# Altium footprint library basicfootprints.PcbLib: 522 footprints (part 23 of 33)
Each footprint in its own frame and in the unit in brackets; x right, y up, seen from the top. Pads: shape width x height; smd on the part's side, far side on the other; paste and mask are expansions set on the pad; w line width, h text height; cw(c..) or ccw(c..) is an arc to the next point about the centre after c.
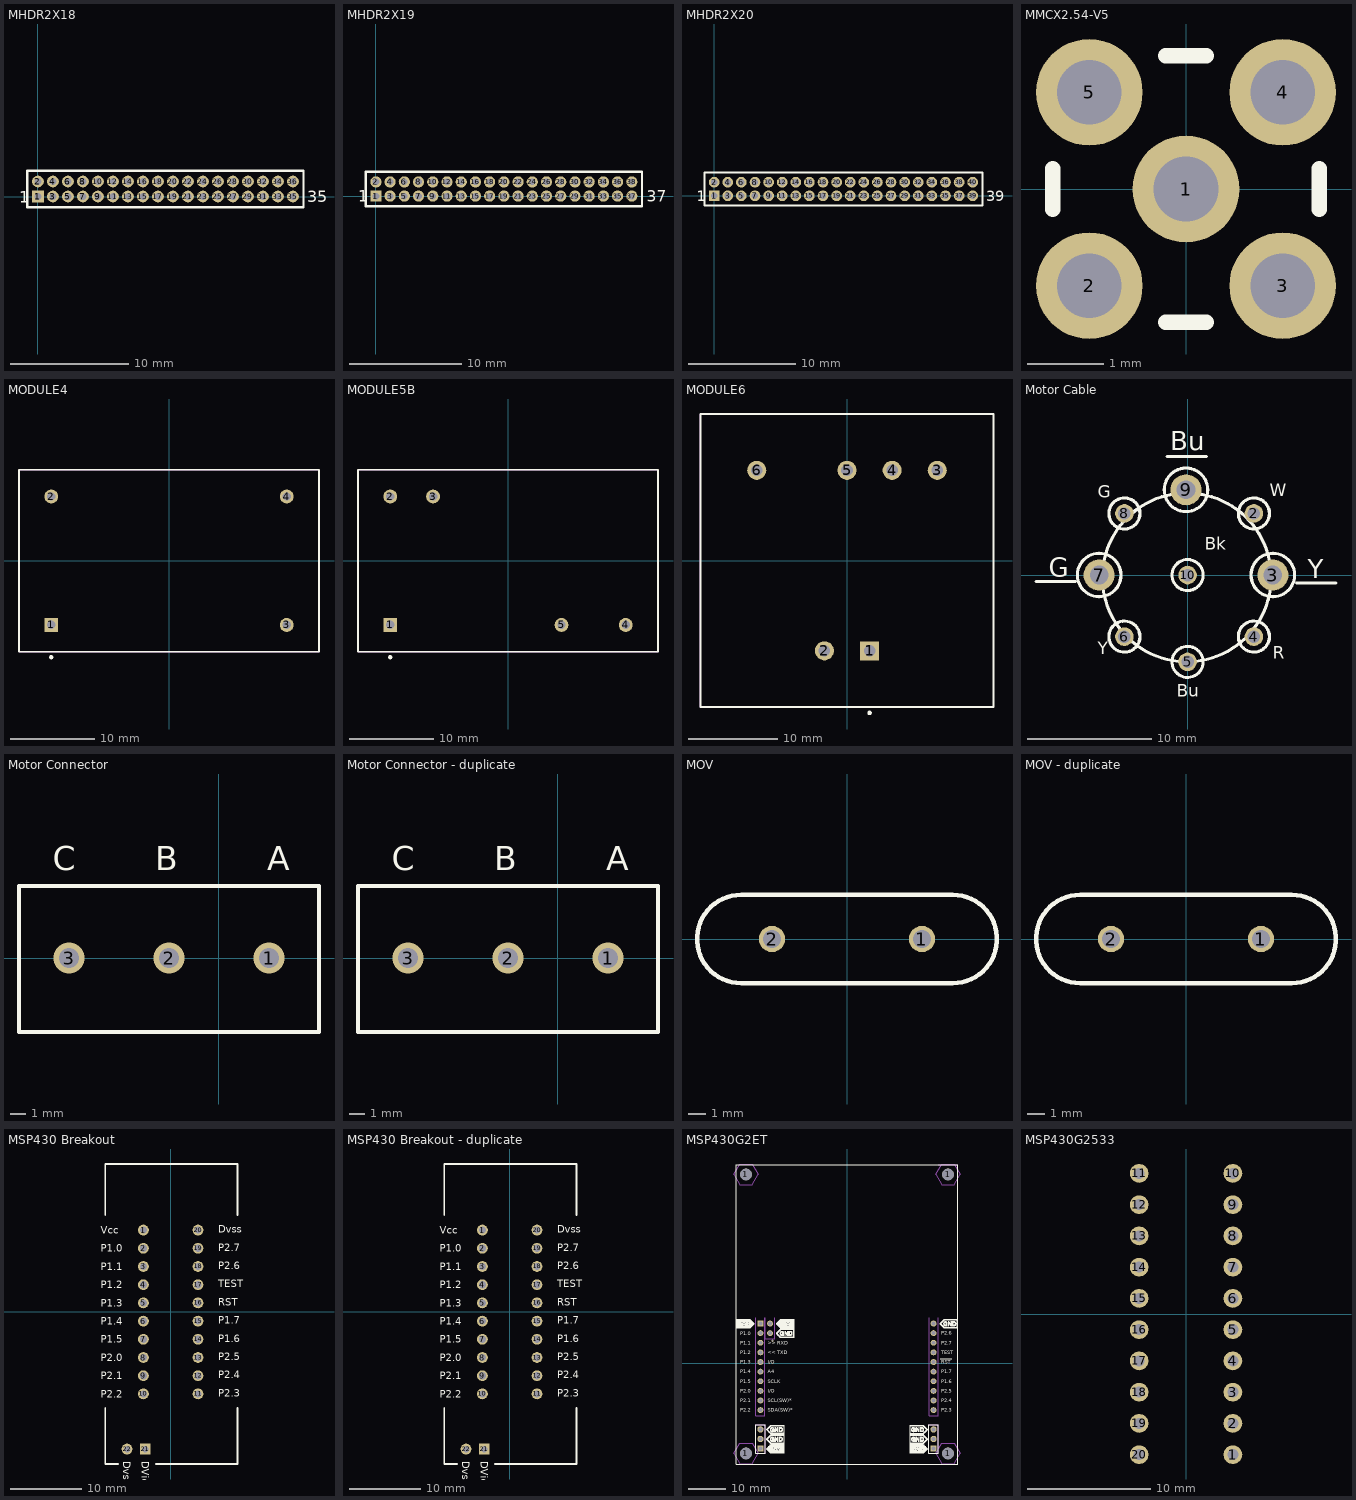
[diagram p22: the footprints below, top view; thin cyan lines are the x and y axes]

## MHDR2X18 [mm] "Connector; Header; 18x2 Position"
pads (36):
  rect 1x1 hole 0.6: 1(0,0)
  round 1 hole 0.6: 2(0,1.27) 3(1.27,0) 4(1.27,1.27) 5(2.54,0) 6(2.54,1.27) 7(3.81,0) 8(3.81,1.27) 9(5.08,0) 10(5.08,1.27) 11(6.35,0) 12(6.35,1.27) 13(7.62,0) 14(7.62,1.27) 15(8.89,0) 16(8.89,1.27) 17(10.16,0) 18(10.16,1.27) 19(11.43,0) 20(11.43,1.27) 21(12.7,0) 22(12.7,1.27) 23(13.97,0) 24(13.97,1.27) 25(15.24,0) 26(15.24,1.27) 27(16.51,0) 28(16.51,1.27) 29(17.78,0) 30(17.78,1.27) 31(19.05,0) 32(19.05,1.27) 33(20.32,0) 34(20.32,1.27) 35(21.59,0) 36(21.59,1.27)
Top Overlay:
  lines w0.2: -0.9,-0.9 22.49,-0.9 22.49,2.17 -0.9,2.17 -0.9,-0.9
  text "1" at -1.6,-0.508 h1
  text "35" at 22.8,-0.501 h1

## MHDR2X19 [mm] "Connector; Header; 19x2 Position"
pads (38):
  rect 1x1 hole 0.6: 1(0,0)
  round 1 hole 0.6: 2(0,1.27) 3(1.27,0) 4(1.27,1.27) 5(2.54,0) 6(2.54,1.27) 7(3.81,0) 8(3.81,1.27) 9(5.08,0) 10(5.08,1.27) 11(6.35,0) 12(6.35,1.27) 13(7.62,0) 14(7.62,1.27) 15(8.89,0) 16(8.89,1.27) 17(10.16,0) 18(10.16,1.27) 19(11.43,0) 20(11.43,1.27) 21(12.7,0) 22(12.7,1.27) 23(13.97,0) 24(13.97,1.27) 25(15.24,0) 26(15.24,1.27) 27(16.51,0) 28(16.51,1.27) 29(17.78,0) 30(17.78,1.27) 31(19.05,0) 32(19.05,1.27) 33(20.32,0) 34(20.32,1.27) 35(21.59,0) 36(21.59,1.27) 37(22.86,0) 38(22.86,1.27)
Top Overlay:
  lines w0.2: -0.9,-0.9 23.76,-0.9 23.76,2.17 -0.9,2.17 -0.9,-0.9
  text "1" at -1.6,-0.508 h1
  text "37" at 24.2,-0.508 h1

## MHDR2X20 [mm] "Connector; Header; 20x2 Position"
pads (40):
  rect 1x1 hole 0.6: 1(0,0)
  round 1 hole 0.6: 2(0,1.27) 3(1.27,0) 4(1.27,1.27) 5(2.54,0) 6(2.54,1.27) 7(3.81,0) 8(3.81,1.27) 9(5.08,0) 10(5.08,1.27) 11(6.35,0) 12(6.35,1.27) 13(7.62,0) 14(7.62,1.27) 15(8.89,0) 16(8.89,1.27) 17(10.16,0) 18(10.16,1.27) 19(11.43,0) 20(11.43,1.27) 21(12.7,0) 22(12.7,1.27) 23(13.97,0) 24(13.97,1.27) 25(15.24,0) 26(15.24,1.27) 27(16.51,0) 28(16.51,1.27) 29(17.78,0) 30(17.78,1.27) 31(19.05,0) 32(19.05,1.27) 33(20.32,0) 34(20.32,1.27) 35(21.59,0) 36(21.59,1.27) 37(22.86,0) 38(22.86,1.27) 39(24.13,0) 40(24.13,1.27)
Top Overlay:
  lines w0.2: -0.9,-0.9 25.03,-0.9 25.03,2.17 -0.9,2.17 -0.9,-0.9
  text "1" at -1.6,-0.508 h1
  text "39" at 25.4,-0.508 h1

## MMCX2.54-V5 [mm] "Connector; RF Coaxial, MMCX, Thru-Hole; 5 Position; Vertical"
height 4.45
pads (5):
  round 1.4 hole 0.85: 1(0,0) 2(-1.27,-1.27) 3(1.27,-1.27) 4(1.27,1.27) 5(-1.27,1.27)
Top Overlay:
  lines w0.2: -1.75,-0.27 -1.75,0.27 ; -0.27,-1.75 0.27,-1.75 ; -0.27,1.75 0.27,1.75 ; 1.75,-0.27 1.75,0.27

## MODULE4 [mm] "DIP; 4 Round Pins; Row Space 27.94 mm; Pitch 15.24 mm"
height 14
pads (4):
  rect 1.65x1.65 hole 1: 1(-13.97,-7.62)
  round 1.65 hole 1: 2(-13.97,7.62) 3(13.97,-7.62) 4(13.97,7.62)
Top Overlay:
  circle w0.25: c-13.97,-11.45 r0.125
  lines w0.2: -17.8,-10.8 17.8,-10.8 17.8,10.8 -17.8,10.8 -17.8,-10.8
Mechanical 13:
  lines w0.1: -17.8,-10.8 17.8,-10.8 17.8,10.8 -17.8,10.8 -17.8,-10.8
3D body: height 14, standoff 0, extent -17.8,-10.8 17.8,10.8

## MODULE5B [mm] "DIP; 5 Round Pins; Row Space 15.24 mm; Pitch 2.54 mm"
height 14
pads (5):
  rect 1.65x1.65 hole 1: 1(-13.97,-7.62)
  round 1.65 hole 1: 2(-13.97,7.62) 3(-8.89,7.62) 4(13.97,-7.62) 5(6.35,-7.62)
Top Overlay:
  circle w0.25: c-13.97,-11.45 r0.125
  lines w0.2: -17.8,-10.8 17.8,-10.8 17.8,10.8 -17.8,10.8 -17.8,-10.8
Mechanical 13:
  lines w0.1: -17.8,-10.8 -17.8,10.8 17.8,10.8 17.8,-10.8 -17.8,-10.8
3D body: height 14, standoff 0, extent -17.8,-10.8 17.8,10.8

## MODULE6 [mm] "DIP; 6 Round Pins; Row Space 20.32 mm; Pitch 2.54 mm"
height 16.5
pads (6):
  rect 2.15x2.15 hole 1.3: 1(2.54,-10.16)
  round 2.15 hole 1.3: 2(-2.54,-10.16) 3(10.16,10.16) 4(5.08,10.16) 5(0,10.16) 6(-10.16,10.16)
Top Overlay:
  circle w0.25: c2.54,-17.15 r0.125
  lines w0.2: -16.5,-16.5 -16.5,16.5 16.5,16.5 16.5,-16.5 -16.5,-16.5
Mechanical 13:
  lines w0.1: -16.5,-16.5 -16.5,16.5 16.5,16.5 16.5,-16.5 -16.5,-16.5
3D body: height 16.5, standoff 0, extent -16.5,-16.5 16.5,16.5

## Motor Cable [mm]
height 5.6
pads (9):
  round 1.5 hole 1: 2(5.334,4.953) 4(5.334,-4.953) 5(0,-6.985) 6(-5.08,-4.953) 8(-5.08,4.953) 10(0,0)
  round 2.5 hole 1.5: 3(6.858,0) 7(-7.112,0) 9(-0.127,6.858)
Top Overlay:
  circle w0.254: c5.334,4.953 r1.25
  circle w0.254: c-0.063,-0.19 r6.788
  circle w0.254: c-5.08,-4.953 r1.25
  circle w0.254: c0,-6.985 r1.25
  circle w0.254: c-5.08,4.953 r1.25
  circle w0.254: c0,0 r1.25
  circle w0.254: c5.334,-4.953 r1.25
  circle w0.254: c-7.112,0 r1.75
  circle w0.254: c6.858,0 r1.75
  circle w0.254: c-0.127,6.858 r1.75
  lines w0.254: -12.192,-0.508 -9.017,-0.508 ; -1.651,9.525 1.524,9.525 ; 8.763,-0.635 11.938,-0.635
  text "W" at 6.604,6.35 h1
  text "Bu" at -0.889,-9.779 h1
  text "Bu" at -1.397,10.033 h1.52
  text "Bk" at 1.397,2.032 h1
  text "R" at 6.858,-6.731 h1
  text "Y" at -7.239,-6.35 h1
  text "G" at -7.239,6.223 h1
  text "Y" at 9.652,-0.254 h1.52
  text "G" at -11.176,-0.127 h1.52

## Motor Connector [mm] "Phoenix 3-terminal Block Screw connector"
pads (3):
  round 2 hole 1.3: 1(3.175,0) 2(-3.175,0) 3(-9.525,0)
Top Overlay:
  lines w0.254: -12.7,-4.699 6.35,-4.699 6.35,4.572 -12.7,4.572 -12.7,-4.699
  text "A" at 3.048,5.588 h1.52
  text "B" at -4.064,5.588 h1.52
  text "C" at -10.541,5.588 h1.52
3D body "User Library-3 Way PCB Screw Terminal Block 5mm.step": height 15.2, standoff -3.5, extent -10.548,-4.555 4.452,4.445

## Motor Connector - duplicate [mm] "Phoenix 3-terminal Block Screw connector"
pads (3):
  round 2 hole 1.3: 1(3.175,0) 2(-3.175,0) 3(-9.525,0)
Top Overlay:
  lines w0.254: -12.7,-4.699 6.35,-4.699 6.35,4.572 -12.7,4.572 -12.7,-4.699
  text "A" at 3.048,5.588 h1.52
  text "B" at -4.064,5.588 h1.52
  text "C" at -10.541,5.588 h1.52
3D body "User Library-3 Way PCB Screw Terminal Block 5mm.step": height 15.2, standoff -3.5, extent -10.548,-4.555 4.452,4.445

## MOV [mm] "ZA Series MOXV"
pads (2):
  round 1.5 hole 1: 1(4.25,0) 2(-4.25,0)
Top Overlay:
  lines w0.254: -6,-2.5 cw(c-6,0) -6,2.5 6,2.5 cw(c6,0) 6,-2.5 -6,-2.5

## MOV - duplicate [mm] "ZA Series MOXV"
pads (2):
  round 1.5 hole 1: 1(4.25,0) 2(-4.25,0)
Top Overlay:
  lines w0.254: -6,-2.5 cw(c-6,0) -6,2.5 6,2.5 cw(c6,0) 6,-2.5 -6,-2.5

## MSP430 Breakout [mm] "MSP430F5172 Breakout Board for ECE 482"
pads (22):
  round 1.5 hole 1: 1(-3.81,11.43) 2(-3.81,8.89) 3(-3.81,6.35) 4(-3.81,3.81) 5(-3.81,1.27) 6(-3.81,-1.27) 7(-3.81,-3.81) 8(-3.81,-6.35) 9(-3.81,-8.89) 10(-3.81,-11.43) 11(3.81,-11.43) 12(3.81,-8.89) 13(3.81,-6.35) 14(3.81,-3.81) 15(3.81,-1.27) 16(3.81,1.27) 17(3.81,3.81) 18(3.81,6.35) 19(3.81,8.89) 20(3.81,11.43)
  rect 1.5x1.5 hole 0.9: 21(-3.556,-19.126)
  round 1.5 hole 0.9: 22(-6.096,-19.126)
Top Overlay:
  lines w0.254: -9.144,-13.386 -9.144,-21.209 -7.341,-21.209 ; -9.144,13.487 -9.144,20.65 9.296,20.65 9.296,13.487 ; -2.057,-21.209 9.296,-21.209 9.296,-13.386
  text "P2.2" at -9.779,-11.938 h1
  text "P2.1" at -9.779,-9.398 h1
  text "P2.0" at -9.779,-6.858 h1
  text "P1.5" at -9.779,-4.318 h1
  text "P1.4" at -9.779,-1.778 h1
  text "P1.3" at -9.779,0.762 h1
  text "P1.2" at -9.779,3.302 h1
  text "P1.1" at -9.779,5.842 h1
  text "P1.0" at -9.779,8.382 h1
  text "Vcc" at -9.779,10.922 h1
  text "Dvss" at 6.604,11.049 h1
  text "P2.7" at 6.604,8.509 h1
  text "P2.6" at 6.604,5.969 h1
  text "TEST" at 6.604,3.429 h1
  text "RST" at 6.604,0.889 h1
  text "P1.7" at 6.604,-1.651 h1
  text "P1.6" at 6.604,-4.191 h1
  text "P2.5" at 6.604,-6.731 h1
  text "P2.4" at 6.604,-9.271 h1
  text "P2.3" at 6.604,-11.811 h1
  text "Dvss" at -6.604,-20.853 h1
  text "DVio" at -4.064,-20.853 h1
3D body "LaunchPad-Adapter-PCB-v2.step": height 6.3, standoff -5.1, extent -8.611,-20.879 8.915,20.269

## MSP430 Breakout - duplicate [mm] "MSP430F5172 Breakout Board for ECE 482"
pads (22):
  round 1.5 hole 1: 1(-3.81,11.43) 2(-3.81,8.89) 3(-3.81,6.35) 4(-3.81,3.81) 5(-3.81,1.27) 6(-3.81,-1.27) 7(-3.81,-3.81) 8(-3.81,-6.35) 9(-3.81,-8.89) 10(-3.81,-11.43) 11(3.81,-11.43) 12(3.81,-8.89) 13(3.81,-6.35) 14(3.81,-3.81) 15(3.81,-1.27) 16(3.81,1.27) 17(3.81,3.81) 18(3.81,6.35) 19(3.81,8.89) 20(3.81,11.43)
  rect 1.5x1.5 hole 0.9: 21(-3.556,-19.126)
  round 1.5 hole 0.9: 22(-6.096,-19.126)
Top Overlay:
  lines w0.254: -9.144,-13.386 -9.144,-21.209 -7.341,-21.209 ; -9.144,13.487 -9.144,20.65 9.296,20.65 9.296,13.487 ; -2.057,-21.209 9.296,-21.209 9.296,-13.386
  text "P2.2" at -9.779,-11.938 h1
  text "P2.1" at -9.779,-9.398 h1
  text "P2.0" at -9.779,-6.858 h1
  text "P1.5" at -9.779,-4.318 h1
  text "P1.4" at -9.779,-1.778 h1
  text "P1.3" at -9.779,0.762 h1
  text "P1.2" at -9.779,3.302 h1
  text "P1.1" at -9.779,5.842 h1
  text "P1.0" at -9.779,8.382 h1
  text "Vcc" at -9.779,10.922 h1
  text "Dvss" at 6.604,11.049 h1
  text "P2.7" at 6.604,8.509 h1
  text "P2.6" at 6.604,5.969 h1
  text "TEST" at 6.604,3.429 h1
  text "RST" at 6.604,0.889 h1
  text "P1.7" at 6.604,-1.651 h1
  text "P1.6" at 6.604,-4.191 h1
  text "P2.5" at 6.604,-6.731 h1
  text "P2.4" at 6.604,-9.271 h1
  text "P2.3" at 6.604,-11.811 h1
  text "Dvss" at -6.604,-20.853 h1
  text "DVio" at -4.064,-20.853 h1
3D body "LaunchPad-Adapter-PCB-v2.step": height 6.3, standoff -5.1, extent -8.611,-20.879 8.915,20.269

## MSP430G2ET [mm] "MSP430 Launchapad connector"
pads (34):
  round 3.048 hole 3.175 unplated mask+0.381: 1(-26.67,-23.825) 1(-26.67,49.835) 1(26.67,-23.825) 1(26.67,49.835)
  rrect6% 1.55x1.55 hole 1.02: 1(-22.86,10.465)
  rect 1.65x1.65 hole 1.016: 1(22.86,-22.555) 21(-22.86,-22.555)
  round 1.55 hole 1.02: 2(-22.86,7.925) 3(-22.86,5.385) 4(-22.86,2.845) 5(-22.86,0.305) 6(-22.86,-2.235) 7(-22.86,-4.775) 8(-22.86,-7.315) 9(-22.86,-9.855) 10(-22.86,-12.395) 11(22.86,-12.395) 12(22.86,-9.855) 13(22.86,-7.315) 14(22.86,-4.775) 15(22.86,-2.235) 16(22.86,0.305) 17(22.86,2.845) 18(22.86,5.385) 19(22.86,7.925) 20(-20.32,7.925) 20(22.86,10.465) 21(-20.32,10.465)
  round 1.65 hole 1.016: 20(-22.86,-20.015) 20(-22.86,-17.475) 20(22.86,-20.015) 20(22.86,-17.475)
  round 2.8 hole 3 unplated mask+0.102: ""(-26.67,49.835) ""(26.67,49.835)
via -19.68,5.935 diameter 0.6 hole 0.3
Mid-Layer 2:
  region: 23.072,-16.684 23.27,-16.766 23.44,-16.896 23.57,-17.066 23.652,-17.263 23.68,-17.475 23.652,-17.688 23.57,-17.885 23.44,-18.055 23.27,-18.185 23.072,-18.267 22.86,-18.295 22.648,-18.267 22.45,-18.185 22.28,-18.055 22.15,-17.885 22.068,-17.688 22.04,-17.475 22.068,-17.263 22.15,-17.066 22.28,-16.896 22.45,-16.766 22.648,-16.684 22.86,-16.656
  region: -22.648,-16.684 -22.45,-16.766 -22.28,-16.896 -22.15,-17.066 -22.068,-17.263 -22.04,-17.475 -22.068,-17.688 -22.15,-17.885 -22.28,-18.055 -22.45,-18.185 -22.648,-18.267 -22.86,-18.295 -23.072,-18.267 -23.27,-18.185 -23.44,-18.055 -23.57,-17.885 -23.652,-17.688 -23.68,-17.475 -23.652,-17.263 -23.57,-17.066 -23.44,-16.896 -23.27,-16.766 -23.072,-16.684 -22.86,-16.656
  region: 23.072,-19.224 23.27,-19.306 23.44,-19.436 23.57,-19.606 23.652,-19.803 23.68,-20.015 23.652,-20.228 23.57,-20.425 23.44,-20.595 23.27,-20.725 23.072,-20.807 22.86,-20.835 22.648,-20.807 22.45,-20.725 22.28,-20.595 22.15,-20.425 22.068,-20.228 22.04,-20.015 22.068,-19.803 22.15,-19.606 22.28,-19.436 22.45,-19.306 22.648,-19.224 22.86,-19.196
  region: -22.648,-19.224 -22.45,-19.306 -22.28,-19.436 -22.15,-19.606 -22.068,-19.803 -22.04,-20.015 -22.068,-20.228 -22.15,-20.425 -22.28,-20.595 -22.45,-20.725 -22.648,-20.807 -22.86,-20.835 -23.072,-20.807 -23.27,-20.725 -23.44,-20.595 -23.57,-20.425 -23.652,-20.228 -23.68,-20.015 -23.652,-19.803 -23.57,-19.606 -23.44,-19.436 -23.27,-19.306 -23.072,-19.224 -22.86,-19.196
Top Overlay:
  drawing of 7019 lines, arcs and shapes, not listed
  text "P1.0" at -28.21,7.435 h1
  text "P1.1" at -28.21,4.895 h1
  text "P1.2" at -28.21,2.355 h1
  text "P1.3" at -28.21,-0.185 h1
  text "P1.4" at -28.21,-2.725 h1
  text "P1.5" at -28.21,-5.265 h1
  text "P2.0" at -28.21,-7.805 h1
  text "P2.1" at -28.21,-10.345 h1
  text "P2.2" at -28.21,-12.885 h1
  text "P2.3" at 24.84,-12.875 h1
  text "P2.4" at 24.84,-10.335 h1
  text "P2.5" at 24.84,-7.795 h1
  text "P1.6" at 24.84,-5.255 h1
  text "P1.7" at 24.84,-2.715 h1
  text "RST" at 24.84,-0.175 h1
  text "TEST" at 24.84,2.365 h1
  text "P2.7" at 24.84,4.905 h1
  text "P2.6" at 24.84,7.445 h1
  text ">> RXD" at -20.88,4.905 h1
  text "<< TXD" at -20.88,2.365 h1
  text "I/O" at -20.88,-0.175 h1
  text "A4" at -20.88,-2.715 h1
  text "SCLK" at -20.88,-5.255 h1
  text "I/O" at -20.88,-7.795 h1
  text "SCL(SW)*" at -20.88,-10.335 h1
  text "SDA(SW)*" at -20.88,-12.875 h1
Bottom Overlay:
  drawing of 7015 lines, arcs and shapes, not listed
  text "P2.2" at -24.76,-12.875 h1
  text "P2.1" at -24.76,-10.335 h1
  text "P2.0" at -24.76,-7.795 h1
  text "P1.5" at -24.76,-5.255 h1
  text "P1.4" at -24.76,-2.715 h1
  text "P1.3" at -24.76,-0.175 h1
  text "P1.2" at -24.76,2.365 h1
  text "P1.1" at -24.76,4.905 h1
  text "P1.0" at -24.76,7.445 h1
  text "P2.6" at 28.31,7.475 h1
  text "P2.7" at 28.31,4.935 h1
  text "TEST" at 28.31,2.395 h1
  text "RST" at 28.31,-0.145 h1
  text "P1.7" at 28.31,-2.685 h1
  text "P1.6" at 28.31,-5.225 h1
  text "P2.5" at 28.31,-7.765 h1
  text "P2.4" at 28.31,-10.305 h1
  text "P2.3" at 28.31,-12.845 h1
Mechanical 1:
  lines w0.254: 24.13,52.375 29.21,52.375 ; 29.21,-26.365 29.21,11.735
Mechanical 5:
  lines w0.127: -24.13,-23.825 -21.59,-23.825 -21.59,-16.205 -24.13,-16.205 -24.13,-23.825 ; 21.59,-23.825 21.59,-16.205 24.13,-16.205 24.13,-23.825 21.59,-23.825
Mechanical 6:
  lines w0.1: -24.067,11.989 -24.067,-13.919 -21.653,-13.919 -21.653,11.989 ; -21.526,11.989 -21.526,6.401 -19.113,6.401 -19.113,11.989 ; 21.653,11.989 21.653,-13.919 24.066,-13.919 24.066,11.989 ; -29.857,-23.825 -28.26,-21.075 -25.08,-21.075 -23.483,-23.825 -25.08,-26.575 -28.26,-26.575 -29.857,-23.825 ; -29.857,49.835 -28.26,52.585 -25.08,52.585 -23.483,49.835 -25.08,47.085 -28.26,47.085 -29.857,49.835 ; 23.483,-23.825 25.08,-21.075 28.26,-21.075 29.857,-23.825 28.26,-26.575 25.08,-26.575 23.483,-23.825 ; 23.483,49.835 25.08,52.585 28.26,52.585 29.857,49.835 28.26,47.085 25.08,47.085 23.483,49.835
3D body: height 8.38, standoff -3.05, extent 22.556,-17.779 23.164,-17.171
3D body: height 8.38, standoff -3.05, extent 22.556,-20.319 23.164,-19.711
3D body: height 8.38, standoff -3.05, extent 22.556,-22.859 23.164,-22.251
3D body: height 2.54, standoff 0, extent 21.565,-23.851 24.155,-16.18
3D body: height 2.54, standoff 0, extent -24.155,-23.851 -21.565,-16.18
3D body: height 8.38, standoff -3.05, extent -23.164,-22.859 -22.556,-22.251
3D body: height 8.38, standoff -3.05, extent -23.164,-20.319 -22.556,-19.711
3D body: height 8.38, standoff -3.05, extent -23.164,-17.779 -22.556,-17.171
3D body "SSQ-110-03-F-S.stp": height 8.51, standoff -10.01, extent -24.067,-13.919 -21.654,11.989
3D body "SSQ-110-03-F-S.stp": height 8.51, standoff -10.01, extent 21.653,-13.919 24.066,11.989
3D body "SSQ-102-03-F-S.stp": height 8.51, standoff -10.01, extent -21.527,6.401 -19.114,11.989

## MSP430G2533 [mil] "20-pin DIP"
pads (20):
  round 60 hole 35: 1(150,-450) 2(150,-350) 3(150,-250) 4(150,-150) 5(150,-50) 6(150,50) 7(150,150) 8(150,250) 9(150,350) 10(150,450) 11(-150,450) 12(-150,350) 13(-150,250) 14(-150,150) 15(-150,50) 16(-150,-50) 17(-150,-150) 18(-150,-250) 19(-150,-350) 20(-150,-450)